# Altium footprint library AltiumLibraryDDT.PcbLib: 104 footprints (part 1 of 7)
Each footprint in its own frame and in the unit in brackets; x right, y up, seen from the top. Pads: shape width x height; smd on the part's side, far side on the other; paste and mask are expansions set on the pad; w line width, h text height; cw(c..) or ccw(c..) is an arc to the next point about the centre after c.
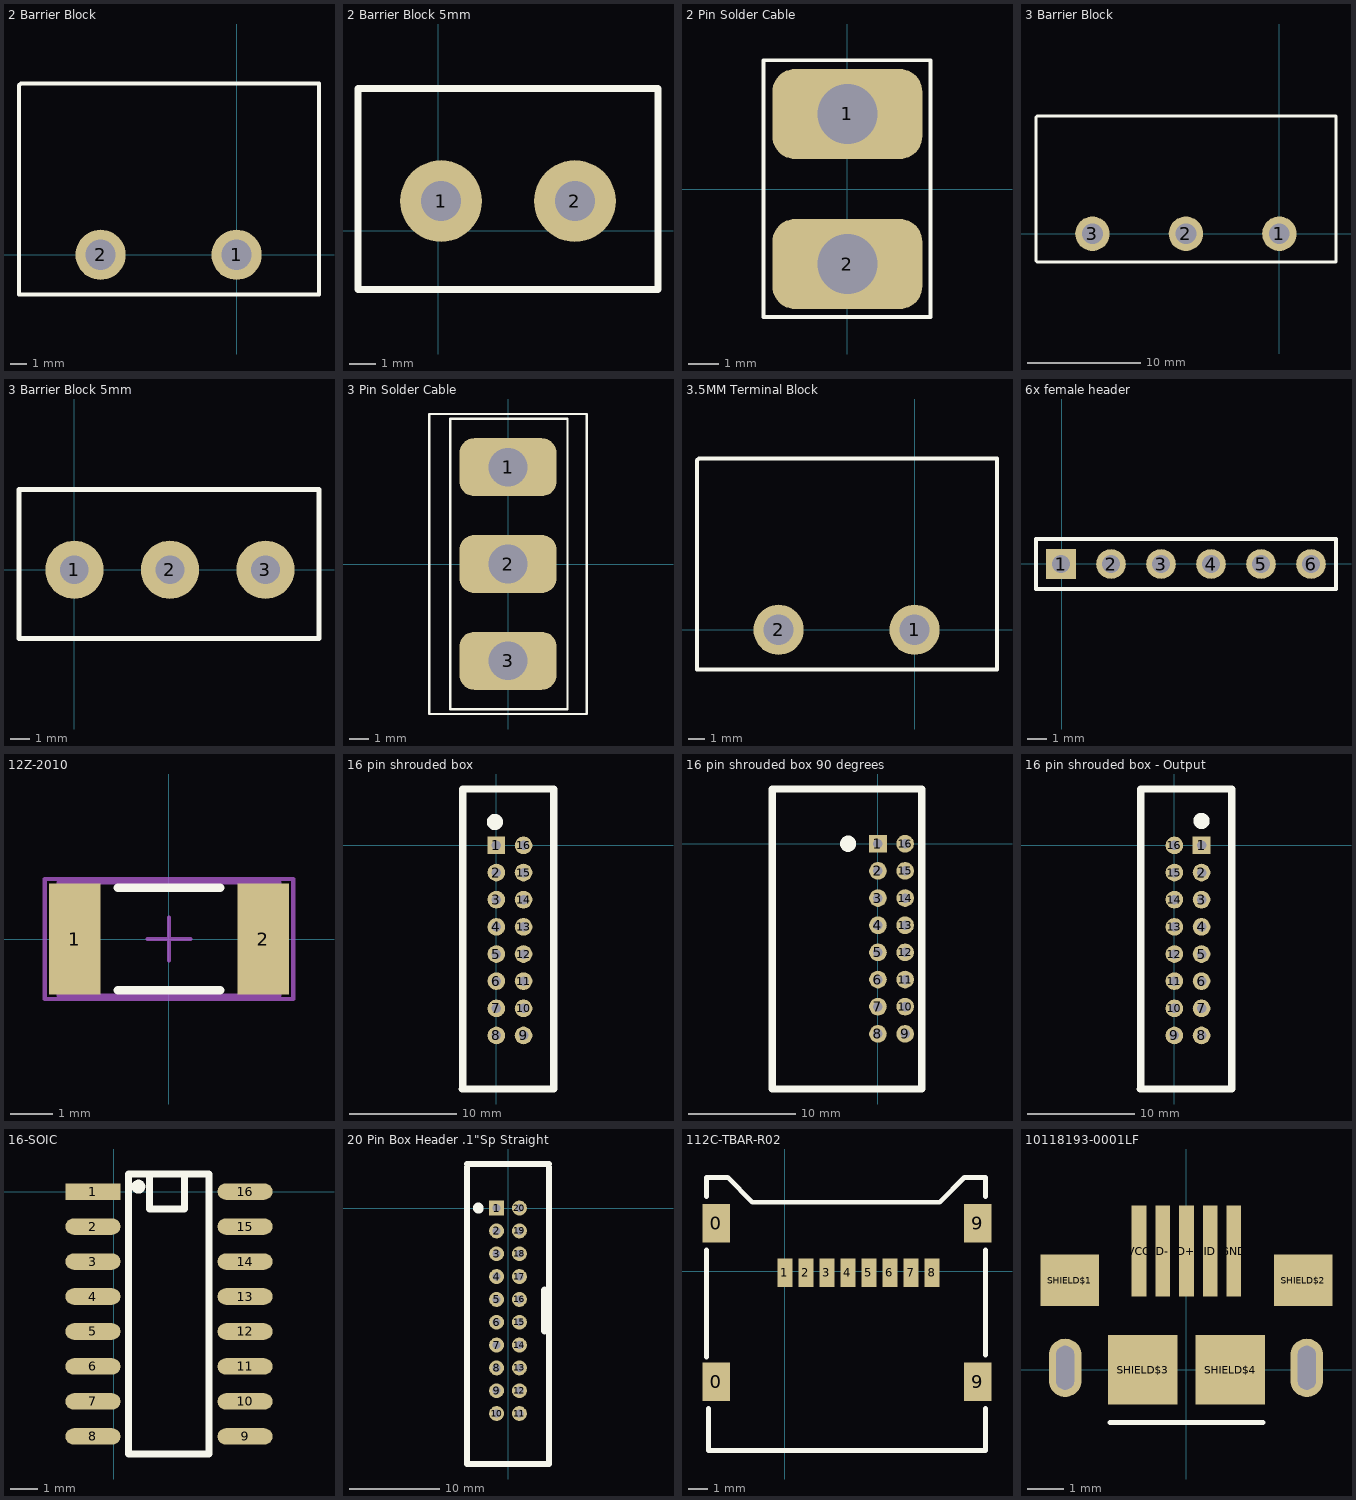
[diagram p0: the footprints below, top view; thin cyan lines are the x and y axes]

## 2 Barrier Block [mil] "A98472-ND"
pads (2):
  round 120 hole 72: 1(0,0) 2(-325,0)
Top Overlay:
  lines w10: -520,-95 -520,405 -515.55,409.45 196.85,409.45 196.85,-95 -520,-95
3D body "4DB-P108-02.stp": height 570, standoff -160, extent -519.98,-96.3 195.02,403.7

## 2 Barrier Block 5mm [mm]
pads (2):
  round 3.048 hole 1.5: 1(0.1,1.1) 2(5.1,1.1)
Top Overlay:
  lines w0.254: -3,-2.2 8.2,-2.2 8.2,5.3 -3,5.3 -3,-2.2
3D body "TE_1776244-2.STEP": height 10, standoff -3.5, extent -3,-2.2 8.16,5.3

## 2 Pin Solder Cable [mm]
pads (2):
  rrect50% 5x3 hole 2: 1(0,2.5) 2(0,-2.5)
Top Overlay:
  lines w0.127: -2.794,-4.267 -2.794,4.293 2.769,4.293 2.769,-4.267 -2.794,-4.267

## 3 Barrier Block [mil] "A98473-ND"
pads (3):
  round 120 hole 72: 1(0,0) 2(-325,0) 3(-650,0)
Top Overlay:
  lines w10: -846.46,-94.49 -842.52,-98.43 196.85,-98.43 196.85,409.45 -842.52,409.45 -846.46,405.51 -846.46,-94.49
3D body "1-796658-8.stp": height 160, standoff -570, extent -846.77,-98.43 193.23,401.57

## 3 Barrier Block 5mm [mil]
pads (3):
  round 120 hole 59.06: 1(0,0) 2(196.85,0) 3(393.7,0)
Top Overlay:
  lines w10: -114.17,-141.73 503.94,-141.73 503.94,165.35 -114.17,165.35 -114.17,-141.73
3D body "Outter.SLDPRT": height 417.32, standoff 15.75, extent -108.27,-145.67 501.97,161.42

## 3 Pin Solder Cable [mm]
pads (3):
  rrect50% 5x3 hole 2: 1(0,5) 2(0,0) 3(0,-5)
Top Overlay:
  lines w0.127: -4.064,-7.747 -4.064,7.747 4.064,7.747 4.064,-7.747 -4.064,-7.747 ; -2.972,-7.493 -2.972,7.493 3.073,7.493 3.073,-7.493 -2.972,-7.493

## 3.5MM Terminal Block [mil]
pads (2):
  round 120 hole 72: 1(0,0) 2(-325,0)
Top Overlay:
  lines w10: -520,-95 196.85,-95 196.85,409.45 -515.55,409.45 -520,405 -520,-95

## 6x female header [mm]
pads (6):
  rect 1.5x1.5 hole 0.9: 1(-0.025,-0.025)
  round 1.5 hole 0.9: 2(2.515,-0.025) 3(5.055,-0.025) 4(7.595,-0.025) 5(10.135,-0.025) 6(12.675,-0.025)
Top Overlay:
  lines w0.2: -1.295,-1.295 -1.295,1.245 13.945,1.245 13.945,-1.295 -1.295,-1.295
3D body "SIL_Socket06_.stp": height 1.46, standoff -17.5, extent -1.295,-1.295 13.945,1.245

## 12Z-2010 [mm] "Chip Resistor, Body 5.0x2.5mm, IPC High Density"
height 0.9
pads (2):
  rect 1.2x2.6 smd: 1(-2.2,0) 2(2.2,0)
Top Overlay:
  lines w0.2: -1.2,-1.2 1.2,-1.2 ; -1.2,1.2 1.2,1.2
Mechanical 13:
  lines w0.1: -2.575,-1.325 -2.575,1.325 2.575,1.325 2.575,-1.325 -2.575,-1.325
Mechanical 15:
  lines w0.1: -0.5,0 0.5,0 ; 0,-0.5 0,0.5 ; -2.9,-1.4 -2.9,1.4 2.9,1.4 2.9,-1.4 -2.9,-1.4
3D body: height 0.9, standoff 0, extent -2.575,-1.325 2.575,1.325

## 16 pin shrouded box [mil]
pads (16):
  rect 65x65 hole 35: 1(0,0)
  round 65 hole 35: 2(0,-100) 3(0,-200) 4(0,-300) 5(0,-400) 6(0,-500) 7(0,-600) 8(0,-700) 9(100,-700) 10(100,-600) 11(100,-500) 12(100,-400) 13(100,-300) 14(100,-200) 15(100,-100) 16(100,0)
Top Overlay:
  circle w39.37: c-5,86 r10
  lines w27.56: -125,-897 209,-897 ; -124.69,-897 -124.69,207.57 ; -123,207.57 207,207.57 ; 210.57,-897 210.57,-620.86 210.57,-68.57 210.57,207.57
3D body: height 350.39, standoff 0, extent -122,-890 205,210

## 16 pin shrouded box 90 degrees [mil]
pads (16):
  rect 65x65 hole 35: 1(0,0)
  round 65 hole 35: 2(0,-100) 3(0,-200) 4(0,-300) 5(0,-400) 6(0,-500) 7(0,-600) 8(0,-700) 9(100,-700) 10(100,-600) 11(100,-500) 12(100,-400) 13(100,-300) 14(100,-200) 15(100,-100) 16(100,0)
Top Overlay:
  circle w39.37: c-110,0 r10
  lines w27.56: 160,-903 -389.69,-903 -389.69,201.57 131.57,201.57 160,201.57 ; 161.57,-903 161.57,-626.86 161.57,-74.57 161.57,201.57
3D body: height 350.39, standoff 0, extent -390,-900 0,200
3D body "zl202-16_p2-54_l20-3_w12-4_h5-1.stp": height 259.06, standoff -59.06, extent -390.18,-750 112.18,50

## 16 pin shrouded box - Output [mil]
pads (16):
  rect 65x65 hole 35: 1(100,0)
  round 65 hole 35: 2(100,-100) 3(100,-200) 4(100,-300) 5(100,-400) 6(100,-500) 7(100,-600) 8(100,-700) 9(0,-700) 10(0,-600) 11(0,-500) 12(0,-400) 13(0,-300) 14(0,-200) 15(0,-100) 16(0,0)
Top Overlay:
  circle w39.37: c100,90 r10
  lines w27.56: -125,-897 209,-897 ; -124.69,-897 -124.69,207.57 ; -123,207.57 207,207.57 ; 210.57,-897 210.57,-620.86 210.57,-68.57 210.57,207.57
3D body: height 350.39, standoff 0, extent -122,-890 205,210

## 16-SOIC [mm] "16-SOIC (ancho 0.154\", 3.90 mm)"
pads (16):
  rect 2x0.6 smd: 1(-0.762,0)
  oval 2x0.6 smd: 2(-0.762,-1.27) 3(-0.762,-2.54) 4(-0.762,-3.81) 5(-0.762,-5.08) 6(-0.762,-6.35) 7(-0.762,-7.62) 8(-0.762,-8.89) 9(4.762,-8.89) 10(4.762,-7.62) 11(4.762,-6.35) 12(4.762,-5.08) 13(4.762,-3.81) 14(4.762,-2.54) 15(4.762,-1.27) 16(4.762,0)
Top Overlay:
  circle w0.254: c0.889,0.178 r0.127
  lines w0.254: 1.295,0.635 2.565,0.635 ; 1.295,0.635 0.533,0.635 0.533,-9.525 3.454,-9.525 3.454,0.635 2.565,0.635 ; 1.295,0.635 1.295,-0.635 2.565,-0.635 2.565,0.635
3D body "User Library-so16-1.SLDPRT": height 1.73, standoff -0.04, extent -1.036,-9.43 5.101,0.54

## 20 Pin Box Header .1"Sp Straight [mil]
pads (20):
  rect 65x65 hole 35: 1(-50,0)
  round 65 hole 35: 2(-50,-100) 3(-50,-200) 4(-50,-300) 5(-50,-400) 6(-50,-500) 7(-50,-600) 8(-50,-700) 9(-50,-800) 10(-50,-900) 11(50,-900) 12(50,-800) 13(50,-700) 14(50,-600) 15(50,-500) 16(50,-400) 17(50,-300) 18(50,-200) 19(50,-100) 20(50,0)
Top Overlay:
  circle w39.37: c-130,0 r3.94
  lines w27.56: -179.13,179.13 -179.13,-1120.87 179.13,-1120.87 179.13,179.13 ; -179.13,193.07 179.13,193.07
  lines w31.5: 160,-537.17 160,-360
3D body: height 346.46, standoff 0, extent -195,-1130 188.75,-1075
3D body: height 346.46, standoff 0, extent -195,152.5 188.75,207.5
3D body: height 346.46, standoff 0, extent 142.5,-1115 192.5,195
3D body: height 346.46, standoff 0, extent -195,-1115 -145,195

## 112C-TBAR-R02 [mm]
pads (12):
  rect 1.45x2 smd: 0(-3.6,-5.8) 0(-3.6,2.5) 9(10.1,-5.8) 9(10.1,2.5)
  rect 0.8x1.5 smd: 1(0,-0.1) 2(1.1,-0.1) 3(2.2,-0.1) 4(3.3,-0.1) 5(4.4,-0.1) 6(5.5,-0.1) 7(6.6,-0.1) 8(7.7,-0.1)
Top Overlay:
  lines w0.254: -4.1,-4.5 -4.1,1.1 ; -4.1,3.9 -4.1,4.9 -3,4.9 -1.7,3.6 8.1,3.6 9.4,4.9 10.5,4.9 10.5,3.9 ; -4,-7.2 -4,-9.4 10.5,-9.4 10.5,-7.2 ; 10.5,-4.4 10.5,1.1
3D body "112C-TBAR-R02.stp": height 1.98, standoff 0.02, extent -4.091,-9.419 10.509,4.981

## 10118193-0001LF [mm]
pads (11):
  rect 0.4x2.5 smd: D+(0,3.25) D-(-0.65,3.25) GND(1.3,3.25) ID(0.65,3.25) VCC(-1.3,3.25)
  rect 1.6x1.4 smd: SHIELD$1(-3.2,2.45) SHIELD$2(3.2,2.45)
  rect 1.9x1.9 smd: SHIELD$3(-1.2,0) SHIELD$4(1.2,0)
  oval 0.9x1.6 hole 1.2 slot 0.5 at 0 deg: ""(-3.325,0.05) ""(3.3,0.05)
Top Overlay:
  lines w0.127: -2.1,-1.45 2.1,-1.45
Mechanical 32:
  lines w0: -3.55,-0.4 ccw(c-3.325,-0.375) -3.3,-0.6 ccw(c-3.275,-0.375) -3.05,-0.4 -3.05,0.4 ccw(c-3.275,0.375) -3.3,0.6 ccw(c-3.325,0.375) -3.55,0.4 -3.55,-0.4 ; 3.05,-0.4 ccw(c3.275,-0.375) 3.3,-0.6 ccw(c3.325,-0.375) 3.55,-0.4 3.55,0.4 ccw(c3.325,0.375) 3.3,0.6 ccw(c3.275,0.375) 3.05,0.4 3.05,-0.4
3D body "10118193-0001lfc.stp": height 2.85, standoff -0.75, extent -3.932,-2.68 3.925,2.98
3D body: height 38, standoff -1.5, extent 5.475,4.55 5.475,4.55